# EAGLE library part HDR6 (library arca)
Header 1x6 2.54
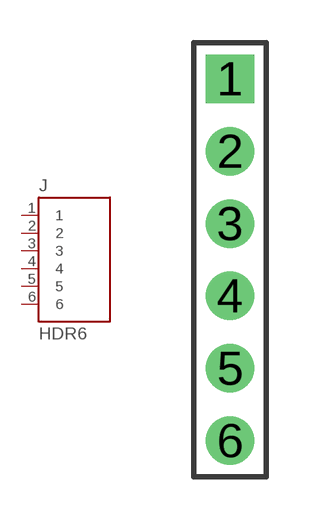
[diagram p1: symbol with the pads of HDR1X6_V; footprint HDR1X6_V]

Designator prefix J

## HDR6  [HDR1X6_V]
1  1  pas
2  2  pas
3  3  pas
4  4  pas
5  5  pas
6  6  pas

## Footprint HDR1X6_V (pad centres in mm)
drill 1 pad 1.7 square: 1 0,6.35
drill 1 pad 1.7 round: 2 0,3.81; 3 0,1.27; 4 0,-1.27; 5 0,-3.81; 6 0,-6.35